# Altium footprint library ubloxLib.PcbLib: 65 footprints (part 2 of 5)
Each footprint in its own frame and in the unit in brackets; x right, y up, seen from the top. Pads: shape width x height; smd on the part's side, far side on the other; paste and mask are expansions set on the pad; w line width, h text height; cw(c..) or ccw(c..) is an arc to the next point about the centre after c.
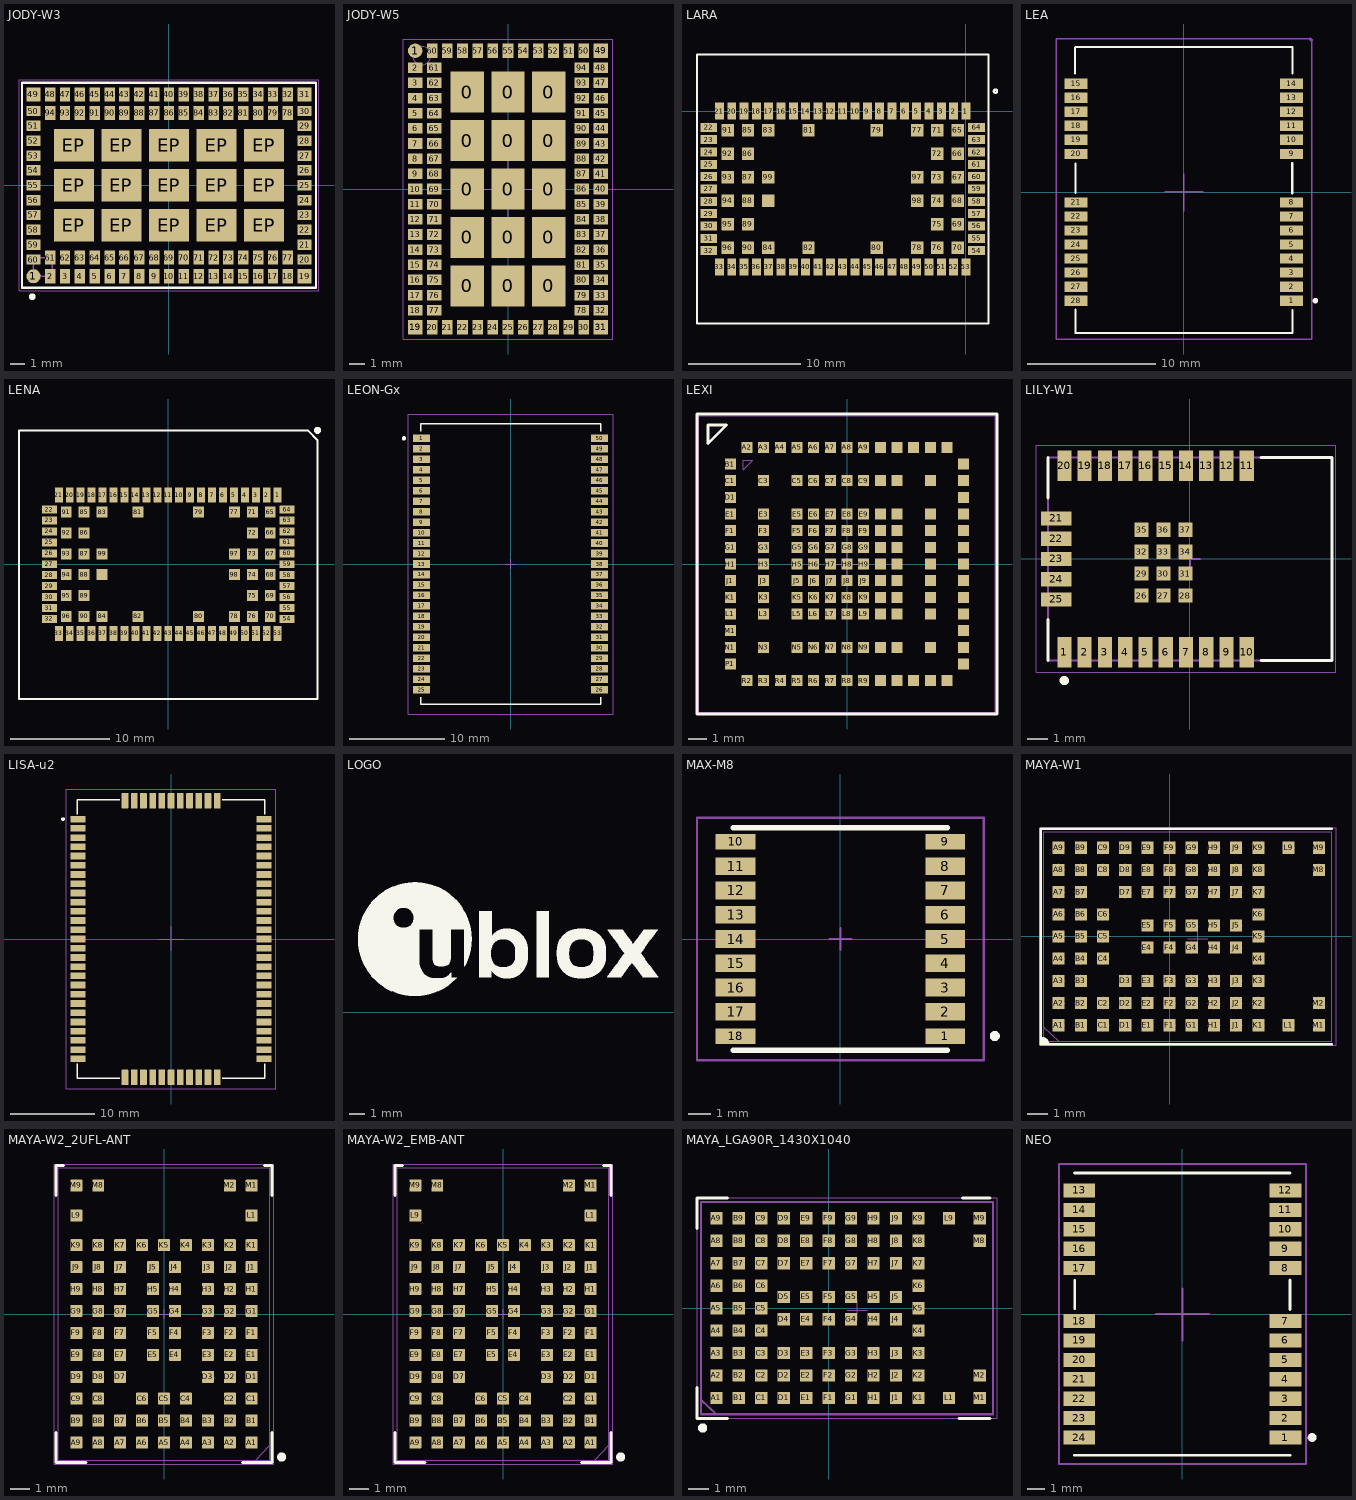
[diagram p1: the footprints below, top view; thin cyan lines are the x and y axes]

## JODY-W3 [mm] "Host-based modules with Wi-Fi and dual-mode Bluetooth"
height 2.5
pads (109):
  round 0.95 smd mask+0.05: 1(-9.125,-6.125)
  rect 0.7x0.95 smd mask+0.05: 2(-8,-6.125) 3(-7,-6.125) 4(-6,-6.125) 5(-5,-6.125) 6(-4,-6.125) 7(-3,-6.125) 8(-2,-6.125) 9(-1,-6.125) 10(0,-6.125) 12(2,-6.125) 13(3,-6.125) 14(4,-6.125) 15(5,-6.125) 17(7,-6.125) 18(8,-6.125) 32(8,6.125) 33(7,6.125) 34(6,6.125) 35(5,6.125) 36(4,6.125) 37(3,6.125) 38(2,6.125) 39(1,6.125) 40(0,6.125) 41(-1,6.125) 42(-2,6.125) 43(-3,6.125) 44(-4,6.125) 45(-5,6.125) 46(-6,6.125) 47(-7,6.125) 48(-8,6.125) 61(-8,-4.875) 62(-7,-4.875) 63(-6,-4.875) 64(-5,-4.875) 65(-4,-4.875) 66(-3,-4.875) 67(-2,-4.875) 68(-1,-4.875) 69(0,-4.875) 70(1,-4.875) 71(2,-4.875) 72(3,-4.875) 73(4,-4.875) 74(5,-4.875) 75(6,-4.875) 76(7,-4.875) 77(8,-4.875) 78(8,4.875) 79(7,4.875) 80(6,4.875) 81(5,4.875) 82(4,4.875) 83(3,4.875) 84(2,4.875) 85(1,4.875) 86(0,4.875) 87(-1,4.875) 88(-2,4.875) 89(-3,4.875) 90(-4,4.875) 91(-5,4.875) 92(-6,4.875) 93(-7,4.875) 94(-8,4.875)
  rect 0.7x0.95 smd paste+0 mask+0.05: 11(1,-6.125) 16(6,-6.125)
  rect 0.95x0.95 smd mask+0.05: 19(9.125,-6.125) 31(9.125,6.125) 49(-9.125,6.125)
  rect 0.95x0.7 smd mask+0.05: 20(9.125,-5) 21(9.125,-4) 22(9.125,-3) 23(9.125,-2) 24(9.125,-1) 25(9.125,0) 26(9.125,1) 27(9.125,2) 28(9.125,3) 29(9.125,4) 30(9.125,5) 50(-9.125,5) 51(-9.125,4) 52(-9.125,3) 53(-9.125,2) 54(-9.125,1) 55(-9.125,0) 56(-9.125,-1) 57(-9.125,-2) 58(-9.125,-3) 59(-9.125,-4) 60(-9.125,-5)
  rect 2.7x2.2 smd paste-10 mask+0.05: EP(-6.4,-2.7) EP(-6.4,0) EP(-6.4,2.7) EP(-3.2,-2.7) EP(-3.2,2.7) EP(-3.2,0) EP(0,-2.7) EP(0,0) EP(0,2.7) EP(3.2,-2.7) EP(3.2,0) EP(3.2,2.7) EP(6.4,2.7) EP(6.4,-2.7) EP(6.4,0)
Top Overlay:
  circle w0.254: c-9.2,-7.5 r0.1
  lines w0.15: -9.9,-6.9 -9.9,6.9 9.9,6.9 9.9,-6.9 -9.9,-6.9
Top Paste:
  rectangle: -7.525,-2.575 -6.525,-1.775
  rectangle: -6.275,-2.575 -5.275,-1.775
  rectangle: -7.525,-3.625 -6.525,-2.825
  rectangle: -6.275,-3.625 -5.275,-2.825
  rectangle: -7.525,0.125 -6.525,0.925
  rectangle: -6.275,0.125 -5.275,0.925
  rectangle: -7.525,-0.925 -6.525,-0.125
  rectangle: -6.275,-0.925 -5.275,-0.125
  rectangle: -4.325,-2.575 -3.325,-1.775
  rectangle: -3.075,-2.575 -2.075,-1.775
  rectangle: -4.325,-3.625 -3.325,-2.825
  rectangle: -3.075,-3.625 -2.075,-2.825
  rectangle: -4.325,0.125 -3.325,0.925
  rectangle: -3.075,0.125 -2.075,0.925
  rectangle: -4.325,-0.925 -3.325,-0.125
  rectangle: -3.075,-0.925 -2.075,-0.125
  rectangle: -1.125,-2.575 -0.125,-1.775
  rectangle: 0.125,-2.575 1.125,-1.775
  rectangle: -1.125,-3.625 -0.125,-2.825
  rectangle: 0.125,-3.625 1.125,-2.825
  rectangle: -1.125,0.125 -0.125,0.925
  rectangle: 0.125,0.125 1.125,0.925
  rectangle: -1.125,-0.925 -0.125,-0.125
  rectangle: 0.125,-0.925 1.125,-0.125
  rectangle: 2.075,0.125 3.075,0.925
  rectangle: 3.325,0.125 4.325,0.925
  rectangle: 2.075,-0.925 3.075,-0.125
  rectangle: 3.325,-0.925 4.325,-0.125
  rectangle: 2.075,-2.575 3.075,-1.775
  rectangle: 3.325,-2.575 4.325,-1.775
  rectangle: 2.075,-3.625 3.075,-2.825
  rectangle: 3.325,-3.625 4.325,-2.825
  rectangle: 5.275,-2.575 6.275,-1.775
  rectangle: 6.525,-2.575 7.525,-1.775
  rectangle: 5.275,-3.625 6.275,-2.825
  rectangle: 6.525,-3.625 7.525,-2.825
  rectangle: 5.275,0.125 6.275,0.925
  rectangle: 6.525,0.125 7.525,0.925
  rectangle: 5.275,-0.925 6.275,-0.125
  rectangle: 6.525,-0.925 7.525,-0.125
  rectangle: 5.275,2.825 6.275,3.625
  rectangle: 6.525,2.825 7.525,3.625
  rectangle: 5.275,1.775 6.275,2.575
  rectangle: 6.525,1.775 7.525,2.575
  rectangle: 2.075,2.825 3.075,3.625
  rectangle: 3.325,2.825 4.325,3.625
  rectangle: 2.075,1.775 3.075,2.575
  rectangle: 3.325,1.775 4.325,2.575
  rectangle: -1.125,2.825 -0.125,3.625
  rectangle: 0.125,2.825 1.125,3.625
  rectangle: -1.125,1.775 -0.125,2.575
  rectangle: 0.125,1.775 1.125,2.575
  rectangle: -4.325,2.825 -3.325,3.625
  rectangle: -3.075,2.825 -2.075,3.625
  rectangle: -4.325,1.775 -3.325,2.575
  rectangle: -3.075,1.775 -2.075,2.575
  rectangle: -7.525,2.825 -6.525,3.625
  rectangle: -6.275,2.825 -5.275,3.625
  rectangle: -7.525,1.775 -6.525,2.575
  rectangle: -6.275,1.775 -5.275,2.575
Mechanical 13:
  circle w0.1: c-8.5,-5.5 r0.632
  lines w0.1: -9.9,-6.9 -9.9,6.9 9.9,6.9 9.9,-6.9 -9.9,-6.9
Mechanical 15:
  lines w0.05: -10.1,-7.1 -10.1,7.1 10.1,7.1 10.1,-7.1 -10.1,-7.1
  lines w0.1: -1,0 1,0 ; 0,-1 0,1
  text ".Designator" at 0.1,0.433 h1
3D body "JODY_W3_3D.STEP": height 2.43, standoff 0.01, extent -9.9,-6.9 9.9,6.9

## JODY-W5 [mm] "Module footprint for EVB (include Paste Mask)"
pads (109):
  rect 2.2x2.7 smd mask+0.05: 0(-2.7,-6.4) 0(-2.7,-3.2) 0(-2.7,0) 0(-2.7,3.2) 0(-2.7,6.4) 0(0,-6.4) 0(0,-3.2) 0(0,0) 0(0,3.2) 0(0,6.4) 0(2.7,-6.4) 0(2.7,-3.2) 0(2.7,0) 0(2.7,3.2) 0(2.7,6.4)
  round 0.95 smd mask+0.05: 1(-6.125,9.125)
  rect 0.95x0.7 smd mask+0.05: 2(-6.125,8) 3(-6.125,7) 4(-6.125,6) 5(-6.125,5) 6(-6.125,4) 7(-6.125,3) 8(-6.125,2) 9(-6.125,1) 10(-6.125,0) 11(-6.125,-1) 12(-6.125,-2) 13(-6.125,-3) 14(-6.125,-4) 15(-6.125,-5) 16(-6.125,-6) 17(-6.125,-7) 18(-6.125,-8) 32(6.125,-8) 33(6.125,-7) 34(6.125,-6) 35(6.125,-5) 36(6.125,-4) 37(6.125,-3) 38(6.125,-2) 39(6.125,-1) 40(6.125,0) 41(6.125,1) 42(6.125,2) 43(6.125,3) 44(6.125,4) 45(6.125,5) 46(6.125,6) 47(6.125,7) 48(6.125,8) 61(-4.875,8) 62(-4.875,7) 63(-4.875,6) 64(-4.875,5) 65(-4.875,4) 66(-4.875,3) 67(-4.875,2) 68(-4.875,1) 69(-4.875,0) 70(-4.875,-1) 71(-4.875,-2) 72(-4.875,-3) 73(-4.875,-4) 74(-4.875,-5) 75(-4.875,-6) 76(-4.875,-7) 77(-4.875,-8) 78(4.875,-8) 79(4.875,-7) 80(4.875,-6) 81(4.875,-5) 82(4.875,-4) 83(4.875,-3) 84(4.875,-2) 85(4.875,-1) 86(4.875,0) 87(4.875,1) 88(4.875,2) 89(4.875,3) 90(4.875,4) 91(4.875,5) 92(4.875,6) 93(4.875,7) 94(4.875,8)
  rect 0.95x0.95 smd mask+0.05: 19(-6.125,-9.125) 31(6.125,-9.125) 49(6.125,9.125)
  rect 0.7x0.95 smd mask+0.05: 20(-5,-9.125) 21(-4,-9.125) 22(-3,-9.125) 23(-2,-9.125) 24(-1,-9.125) 25(0,-9.125) 26(1,-9.125) 27(2,-9.125) 28(3,-9.125) 29(4,-9.125) 30(5,-9.125) 50(5,9.125) 51(4,9.125) 52(3,9.125) 53(2,9.125) 54(1,9.125) 55(0,9.125) 56(-1,9.125) 57(-2,9.125) 58(-3,9.125) 59(-4,9.125) 60(-5,9.125)
Mechanical 11:
  text ".Designator" at 0,0 h0.5
Mechanical 13:
  circle w0.05: c-5.7,8.8 r0.6
  lines w0.05: -6.9,-9.9 6.9,-9.9 6.9,9.9 -6.9,9.9 -6.9,-9.9
  text ".Designator" at 0,0 h0.5
Mechanical 15:
  lines w0.05: -2,0 2,0 ; 0,-2 0,2
3D body: height 2.51, standoff 2.5, extent -6.2,8.3 -5.2,9.3
3D body: height 2.5, standoff 0.75, extent -6.5,-9.5 6.5,9.5
3D body: height 0.75, standoff 0, extent -6.9,-9.9 6.9,9.9

## LARA [mm] "Footprint for LARA modules"
pads (100):
  rect 0.8x1.5 smd paste-2539.97: 1(0,0) 2(-1.1,0) 3(-2.2,0) 4(-3.3,0) 5(-4.4,0) 6(-5.5,0) 7(-6.6,0) 8(-7.7,0) 9(-8.8,0) 10(-9.9,0) 11(-11,0) 12(-12.1,0) 13(-13.2,0) 14(-14.3,0) 15(-15.4,0) 16(-16.5,0) 17(-17.6,0) 18(-18.7,0) 19(-19.8,0) 20(-20.9,0) 21(-22,0) 33(-22,-13.9) 34(-20.9,-13.9) 35(-19.8,-13.9) 36(-18.7,-13.9) 37(-17.6,-13.9) 38(-16.5,-13.9) 39(-15.4,-13.9) 40(-14.3,-13.9) 41(-13.2,-13.9) 42(-12.1,-13.9) 43(-11,-13.9) 44(-9.9,-13.9) 45(-8.8,-13.9) 46(-7.7,-13.9) 47(-6.6,-13.9) 48(-5.5,-13.9) 49(-4.4,-13.9) 50(-3.3,-13.9) 51(-2.2,-13.9) 52(-1.1,-13.9) 53(0,-13.9)
  rect 1.5x0.8 smd paste-2539.97: 22(-22.95,-1.45) 23(-22.95,-2.55) 24(-22.95,-3.65) 25(-22.95,-4.75) 26(-22.95,-5.85) 27(-22.95,-6.95) 28(-22.95,-8.05) 29(-22.95,-9.15) 30(-22.95,-10.25) 31(-22.95,-11.35) 32(-22.95,-12.45) 54(0.95,-12.45) 55(0.95,-11.35) 56(0.95,-10.25) 57(0.95,-9.15) 58(0.95,-8.05) 59(0.95,-6.95) 60(0.95,-5.85) 61(0.95,-4.75) 62(0.95,-3.65) 63(0.95,-2.55) 64(0.95,-1.45)
  rect 1.1x1.1 smd paste-0.025: 65(-0.75,-1.7) 66(-0.75,-3.8) 67(-0.75,-5.9) 68(-0.75,-8) 69(-0.75,-10.1) 70(-0.75,-12.2) 71(-2.55,-1.7) 72(-2.55,-3.8) 73(-2.55,-5.9) 74(-2.55,-8) 75(-2.55,-10.1) 76(-2.55,-12.2) 77(-4.35,-1.7) 78(-4.35,-12.2) 79(-7.95,-1.7) 80(-7.95,-12.2) 81(-14.05,-1.7) 82(-14.05,-12.2) 83(-17.65,-1.7) 84(-17.65,-12.2) 85(-19.45,-1.7) 86(-19.45,-3.8) 87(-19.45,-5.9) 88(-19.45,-8) 89(-19.45,-10.1) 90(-19.45,-12.2) 91(-21.25,-1.7) 92(-21.25,-3.8) 93(-21.25,-5.9) 94(-21.25,-8) 95(-21.25,-10.1) 96(-21.25,-12.2) 97(-4.35,-5.9) 98(-4.35,-8) 99(-17.65,-5.9) 100(-17.65,-8)
Top Overlay:
  circle w0.2: c2.625,1.775 r0.141
  lines w0.2: -24,-18.95 2,-18.95 2,5.05 -24,5.05 -24,-18.95
Top Paste:
  drawing of 64 lines, arcs and shapes, not listed
3D body "Lara.STEP": height 2.63, standoff 0.03, extent -24.029,-18.948 1.971,5.052

## LEA [mm] "u-blox LEA GNSS module"
pads (28):
  rect 1.8x0.8 smd paste-4: 1(8.445,-8.5)
  rect 1.8x0.8 smd paste-0.4 mask+0.102: 2(8.445,-7.4) 3(8.445,-6.3) 4(8.445,-5.2) 5(8.445,-4.1) 6(8.445,-3) 7(8.445,-1.9) 8(8.445,-0.8) 9(8.445,3) 10(8.445,4.1) 11(8.445,5.2) 12(8.445,6.3) 13(8.445,7.4) 14(8.445,8.5) 16(-8.445,7.4) 17(-8.445,6.3) 18(-8.445,5.2) 19(-8.445,4.1) 20(-8.445,3) 21(-8.445,-0.8) 22(-8.445,-1.9) 23(-8.445,-3) 24(-8.445,-4.1) 25(-8.445,-5.2) 26(-8.445,-6.3) 27(-8.445,-7.4) 28(-8.445,-8.5)
  rect 1.8x0.8 smd paste-0.4: 15(-8.445,8.5)
Top Overlay:
  circle w0.38: c10.3,-8.5 r0.026
  lines w0.16: -8.514,9.28 -8.514,11.344 -8.495,11.363 8.497,11.363 8.497,9.28 ; -8.508,-0.08 -8.508,2.238 ; -8.501,-9.198 -8.501,-11.027 -8.489,-11.04 8.485,-11.04 8.497,-11.027 8.497,-9.237 ; 8.485,-0.093 8.485,2.276
Top Paste:
  rectangle: -8.505,-8.8 -7.855,-8.2
  rectangle: -8.505,-6.6 -7.855,-6
  rectangle: -8.505,-5.5 -7.855,-4.9
  rectangle: -8.505,-4.4 -7.855,-3.8
  rectangle: -8.505,-3.3 -7.855,-2.7
  rectangle: -8.505,-2.2 -7.855,-1.6
  rectangle: -8.505,-1.1 -7.855,-0.5
  rectangle: -8.505,-7.7 -7.855,-7.1
  rectangle: -9.604,-8.9 -8.504,-8.1
  rectangle: -9.604,-7.8 -8.504,-7
  rectangle: -9.604,-6.7 -8.504,-5.9
  rectangle: -9.604,-5.6 -8.504,-4.8
  rectangle: -9.604,-4.5 -8.504,-3.7
  rectangle: -9.604,-3.4 -8.504,-2.6
  rectangle: -9.604,-2.3 -8.504,-1.5
  rectangle: -9.604,-1.2 -8.504,-0.4
  rectangle: -8.504,2.7 -7.854,3.3
  rectangle: -8.504,3.8 -7.854,4.4
  rectangle: -8.504,4.9 -7.854,5.5
  rectangle: -8.504,6 -7.854,6.6
  rectangle: -8.504,8.2 -7.854,8.8
  rectangle: -8.504,7.1 -7.854,7.7
  rectangle: -9.604,2.6 -8.504,3.4
  rectangle: -9.604,3.7 -8.504,4.5
  rectangle: -9.604,5.9 -8.504,6.7
  rectangle: -9.604,7 -8.504,7.8
  rectangle: -9.604,8.1 -8.504,8.9
  rectangle: -9.604,4.8 -8.504,5.6
  rectangle: 7.845,-7.7 8.495,-7.1
  rectangle: 7.845,7.1 8.495,7.7
  rectangle: 7.845,8.2 8.495,8.8
  rectangle: 7.845,6 8.495,6.6
  rectangle: 7.845,4.9 8.495,5.5
  rectangle: 7.845,3.8 8.495,4.4
  rectangle: 7.845,2.7 8.495,3.3
  rectangle: 7.845,-1.1 8.495,-0.5
  rectangle: 7.845,-2.2 8.495,-1.6
  rectangle: 7.845,-3.3 8.495,-2.7
  rectangle: 7.845,-4.4 8.495,-3.8
  rectangle: 7.845,-5.5 8.495,-4.9
  rectangle: 7.845,-6.6 8.495,-6
  rectangle: 7.845,-8.8 8.495,-8.2
  rectangle: 8.495,4.8 9.596,5.6
  rectangle: 8.495,8.1 9.596,8.9
  rectangle: 8.495,7 9.596,7.8
  rectangle: 8.495,5.9 9.596,6.7
  rectangle: 8.495,3.7 9.596,4.5
  rectangle: 8.495,2.6 9.596,3.4
  rectangle: 8.496,-1.2 9.596,-0.4
  rectangle: 8.496,-2.3 9.596,-1.5
  rectangle: 8.496,-3.4 9.596,-2.6
  rectangle: 8.496,-4.5 9.596,-3.7
  rectangle: 8.496,-5.6 9.596,-4.8
  rectangle: 8.496,-6.7 9.596,-5.9
  rectangle: 8.496,-7.8 9.596,-7
  rectangle: 8.496,-8.9 9.596,-8.1
Mechanical 15:
  lines w0.1: -1.5,0.019 -0.001,0.019 ; -0.001,-1.5 -0.001,0.019 ; -0.001,1.464 -0.001,0.019 ; 1.5,0.019 -0.001,0.019 ; 9.9,12 -10,12 -10,-11.5 10,-11.5 10,11.9
  lines w0.254: 9.9,12 10,11.9
  text ".Designator" at 0.099,0.452 h1
3D body "LEA ( STEP-AP214).STEP": height 2.35, standoff -0.05, extent -8.502,-11.015 8.498,11.385

## LENA [mm] "Footprint for LENA modules"
pads (100):
  rect 0.8x1.5 smd paste-2539.97: 1(11,6.95) 2(9.9,6.95) 3(8.8,6.95) 4(7.7,6.95) 5(6.6,6.95) 6(5.5,6.95) 7(4.4,6.95) 8(3.3,6.95) 9(2.2,6.95) 10(1.1,6.95) 11(0,6.95) 12(-1.1,6.95) 13(-2.2,6.95) 14(-3.3,6.95) 15(-4.4,6.95) 16(-5.5,6.95) 17(-6.6,6.95) 18(-7.7,6.95) 19(-8.8,6.95) 20(-9.9,6.95) 21(-11,6.95) 33(-11,-6.95) 34(-9.9,-6.95) 35(-8.8,-6.95) 36(-7.7,-6.95) 37(-6.6,-6.95) 38(-5.5,-6.95) 39(-4.4,-6.95) 40(-3.3,-6.95) 41(-2.2,-6.95) 42(-1.1,-6.95) 43(0,-6.95) 44(1.1,-6.95) 45(2.2,-6.95) 46(3.3,-6.95) 47(4.4,-6.95) 48(5.5,-6.95) 49(6.6,-6.95) 50(7.7,-6.95) 51(8.8,-6.95) 52(9.9,-6.95) 53(11,-6.95)
  rect 1.5x0.8 smd paste-2539.97: 22(-11.95,5.5) 23(-11.95,4.4) 24(-11.95,3.3) 25(-11.95,2.2) 26(-11.95,1.1) 27(-11.95,0) 28(-11.95,-1.1) 29(-11.95,-2.2) 30(-11.95,-3.3) 31(-11.95,-4.4) 32(-11.95,-5.5) 54(11.95,-5.5) 55(11.95,-4.4) 56(11.95,-3.3) 57(11.95,-2.2) 58(11.95,-1.1) 59(11.95,0) 60(11.95,1.1) 61(11.95,2.2) 62(11.95,3.3) 63(11.95,4.4) 64(11.95,5.5)
  rect 1.1x1.1 smd paste-0.025: 65(10.25,5.25) 66(10.25,3.15) 67(10.25,1.05) 68(10.25,-1.05) 69(10.25,-3.15) 70(10.25,-5.25) 71(8.45,5.25) 72(8.45,3.15) 73(8.45,1.05) 74(8.45,-1.05) 75(8.45,-3.15) 76(8.45,-5.25) 77(6.65,5.25) 78(6.65,-5.25) 79(3.05,5.25) 80(3.05,-5.25) 81(-3.05,5.25) 82(-3.05,-5.25) 83(-6.65,5.25) 84(-6.65,-5.25) 85(-8.45,5.25) 86(-8.45,3.15) 87(-8.45,1.05) 88(-8.45,-1.05) 89(-8.45,-3.15) 90(-8.45,-5.25) 91(-10.25,5.25) 92(-10.25,3.15) 93(-10.25,1.05) 94(-10.25,-1.05) 95(-10.25,-3.15) 96(-10.25,-5.25) 97(6.65,1.05) 98(6.65,-1.05) 99(-6.65,1.05) 100(-6.65,-1.05)
Top Overlay:
  circle w0.4: c15,13.45 r0.15
  lines w0.2: -15,-13.55 -15,13.45 14,13.45 15,12.45 15,-13.55 -15,-13.55
Top Paste:
  drawing of 64 lines, arcs and shapes, not listed
3D body "LENA-R8.stp": height 2.7, standoff 0, extent -15,-13.55 15,13.45

## LEON-Gx [mm] "quad-band GSM/GPRS data & voice module"
height 3.3
pads (50):
  rrect5% 1.8x0.8 smd paste-1: 1(-9.35,13.2) 2(-9.35,12.1) 3(-9.35,11) 4(-9.35,9.9) 5(-9.35,8.8) 6(-9.35,7.7) 7(-9.35,6.6) 8(-9.35,5.5) 9(-9.35,4.4) 10(-9.35,3.3) 11(-9.35,2.2) 12(-9.35,1.1) 13(-9.35,0) 14(-9.35,-1.1) 15(-9.35,-2.2) 16(-9.35,-3.3) 17(-9.35,-4.4) 18(-9.35,-5.5) 19(-9.35,-6.6) 20(-9.35,-7.7) 21(-9.35,-8.8) 22(-9.35,-9.9) 23(-9.35,-11) 24(-9.35,-12.1) 25(-9.35,-13.2) 26(9.35,-13.2) 27(9.35,-12.1) 28(9.35,-11) 29(9.35,-9.9) 30(9.35,-8.8) 31(9.35,-7.7) 32(9.35,-6.6) 33(9.35,-5.5) 34(9.35,-4.4) 35(9.35,-3.3) 36(9.35,-2.2) 37(9.35,-1.1) 38(9.35,0) 39(9.35,1.1) 40(9.35,2.2) 41(9.35,3.3) 42(9.35,4.4) 43(9.35,5.5) 44(9.35,6.6) 45(9.35,7.7) 46(9.35,8.8) 47(9.35,9.9) 48(9.35,11) 49(9.35,12.1) 50(9.35,13.2)
Top Overlay:
  circle w0.254: c-11.2,13.2 r0.1
  lines w0.15: -9.45,-14 -9.45,-14.75 9.45,-14.75 9.45,-14 ; -9.45,13.95 -9.45,14.75 9.45,14.75 9.45,13.95
Top Paste:
  rectangle: 8.55,12.9 9.45,13.5
  rectangle: 8.55,11.8 9.45,12.4
  rectangle: 8.55,9.6 9.45,10.2
  rectangle: 8.55,10.7 9.45,11.3
  rectangle: 8.55,8.5 9.45,9.1
  rectangle: 8.55,7.4 9.45,8
  rectangle: 8.55,5.2 9.45,5.8
  rectangle: 8.55,6.3 9.45,6.9
  rectangle: 8.55,4.1 9.45,4.7
  rectangle: 8.55,3 9.45,3.6
  rectangle: 8.55,0.8 9.45,1.4
  rectangle: 8.55,1.9 9.45,2.5
  rectangle: 8.55,-0.3 9.45,0.3
  rectangle: 8.55,-1.4 9.45,-0.8
  rectangle: 8.55,-3.6 9.45,-3
  rectangle: 8.55,-2.5 9.45,-1.9
  rectangle: 8.55,-4.7 9.45,-4.1
  rectangle: 8.55,-5.8 9.45,-5.2
  rectangle: 8.55,-8 9.45,-7.4
  rectangle: 8.55,-6.9 9.45,-6.3
  rectangle: 8.55,-9.1 9.45,-8.5
  rectangle: 8.55,-10.2 9.45,-9.6
  rectangle: 8.55,-12.4 9.45,-11.8
  rectangle: 8.55,-11.3 9.45,-10.7
  rectangle: 8.55,-13.5 9.45,-12.9
  rectangle: -9.45,-13.5 -8.55,-12.9
  rectangle: -9.45,-9.1 -8.55,-8.5
  rectangle: -9.45,-11.3 -8.55,-10.7
  rectangle: -9.45,-10.2 -8.55,-9.6
  rectangle: -9.45,-12.4 -8.55,-11.8
  rectangle: -9.45,-4.7 -8.55,-4.1
  rectangle: -9.45,-6.9 -8.55,-6.3
  rectangle: -9.45,-5.8 -8.55,-5.2
  rectangle: -9.45,-8 -8.55,-7.4
  rectangle: -9.45,-0.3 -8.55,0.3
  rectangle: -9.45,-2.5 -8.55,-1.9
  rectangle: -9.45,-1.4 -8.55,-0.8
  rectangle: -9.45,-3.6 -8.55,-3
  rectangle: -9.45,4.1 -8.55,4.7
  rectangle: -9.45,1.9 -8.55,2.5
  rectangle: -9.45,3 -8.55,3.6
  rectangle: -9.45,0.8 -8.55,1.4
  rectangle: -9.45,8.5 -8.55,9.1
  rectangle: -9.45,6.3 -8.55,6.9
  rectangle: -9.45,7.4 -8.55,8
  rectangle: -9.45,5.2 -8.55,5.8
  rectangle: -9.45,9.6 -8.55,10.2
  rectangle: -9.45,11.8 -8.55,12.4
  rectangle: -9.45,10.7 -8.55,11.3
  rectangle: -9.45,12.9 -8.55,13.5
  rectangle: 9.45,11.7 10.65,12.5
  rectangle: 9.45,10.6 10.65,11.4
  rectangle: 9.45,9.5 10.65,10.3
  rectangle: 9.45,8.4 10.65,9.2
  rectangle: 9.45,7.3 10.65,8.1
  rectangle: 9.45,6.2 10.65,7
  rectangle: 9.45,5.1 10.65,5.9
  rectangle: 9.45,4 10.65,4.8
  rectangle: 9.45,2.9 10.65,3.7
  rectangle: 9.45,1.8 10.65,2.6
  rectangle: 9.45,0.7 10.65,1.5
  rectangle: 9.45,-0.4 10.65,0.4
  rectangle: 9.45,-1.5 10.65,-0.7
  rectangle: 9.45,-2.6 10.65,-1.8
  rectangle: 9.45,-3.7 10.65,-2.9
  rectangle: 9.45,-4.8 10.65,-4
  rectangle: 9.45,-5.9 10.65,-5.1
  rectangle: 9.45,-7 10.65,-6.2
  rectangle: 9.45,-8.1 10.65,-7.3
  rectangle: 9.45,-9.2 10.65,-8.4
  rectangle: 9.45,-10.3 10.65,-9.5
  rectangle: 9.45,-11.4 10.65,-10.6
  rectangle: 9.45,-12.5 10.65,-11.7
  rectangle: 9.45,-13.6 10.65,-12.8
  rectangle: -10.65,-8.1 -9.45,-7.3
  rectangle: -10.65,-9.2 -9.45,-8.4
  rectangle: -10.65,-10.3 -9.45,-9.5
  rectangle: -10.65,-11.4 -9.45,-10.6
  rectangle: -10.65,-12.5 -9.45,-11.7
  rectangle: -10.65,-13.6 -9.45,-12.8
  rectangle: -10.65,-7 -9.45,-6.2
  rectangle: -10.65,-5.9 -9.45,-5.1
  rectangle: -10.65,-4.8 -9.45,-4
  rectangle: -10.65,-3.7 -9.45,-2.9
  rectangle: -10.65,-2.6 -9.45,-1.8
  rectangle: -10.65,-1.5 -9.45,-0.7
  rectangle: -10.65,-0.4 -9.45,0.4
  rectangle: -10.65,0.7 -9.45,1.5
  rectangle: -10.65,1.8 -9.45,2.6
  rectangle: -10.65,2.9 -9.45,3.7
  rectangle: -10.65,4 -9.45,4.8
  rectangle: -10.65,5.1 -9.45,5.9
  rectangle: -10.65,6.2 -9.45,7
  rectangle: -10.65,7.3 -9.45,8.1
  rectangle: -10.65,8.4 -9.45,9.2
  rectangle: -10.65,9.5 -9.45,10.3
  rectangle: -10.65,10.6 -9.45,11.4
  rectangle: -10.65,11.7 -9.45,12.5
  rectangle: 9.45,12.8 10.65,13.6
  rectangle: -10.65,12.8 -9.45,13.6
Mechanical 15:
  lines w0.05: -0.5,0 0.5,0 ; 0,-0.5 0,0.5 ; -10.75,-15.75 -10.75,15.75 10.75,15.75 10.75,-15.75 -10.75,-15.75
  text ".Designator" at 0.1,0.433 h1
3D body: height 3.2, standoff 0.9, extent -8.95,-14.2 8.95,14.25
3D body: height 0.9, standoff 0, extent -9.45,-14.75 9.45,14.75
3D body: height 3.3, standoff 3.2, extent -8.575,-13.825 8.575,13.875

## LEXI [mm]
pads (133):
  rect 0.6x0.6 smd mask+0: A2(-5.4,6.3) A3(-4.5,6.3) A4(-3.6,6.3) A5(-2.7,6.3) A6(-1.8,6.3) A7(-0.9,6.3) A8(0,6.3) A9(0.9,6.3) A10(1.8,6.3) A11(2.7,6.3) A12(3.6,6.3) A13(4.5,6.3) A14(5.4,6.3) B1(-6.3,5.4) B15(6.3,5.4) C1(-6.3,4.5) C3(-4.5,4.5) C5(-2.7,4.5) C6(-1.8,4.5) C7(-0.9,4.5) C8(0,4.5) C9(0.9,4.5) C10(1.8,4.5) C11(2.7,4.5) C13(4.5,4.5) C15(6.3,4.5) D1(-6.3,3.6) D15(6.3,3.6) E1(-6.3,2.7) E3(-4.5,2.7) E5(-2.7,2.7) E6(-1.8,2.7) E7(-0.9,2.7) E8(0,2.7) E9(0.9,2.7) E10(1.8,2.7) E11(2.7,2.7) E13(4.5,2.7) E15(6.3,2.7) F1(-6.3,1.8) F3(-4.5,1.8) F5(-2.7,1.8) F6(-1.8,1.8) F7(-0.9,1.8) F8(0,1.8) F9(0.9,1.8) F10(1.8,1.8) F11(2.7,1.8) F13(4.5,1.8) F15(6.3,1.8) G1(-6.3,0.9) G3(-4.5,0.9) G5(-2.7,0.9) G6(-1.8,0.9) G7(-0.9,0.9) G8(0,0.9) G9(0.9,0.9) G10(1.8,0.9) G11(2.7,0.9) G13(4.5,0.9) G15(6.3,0.9) H1(-6.3,0) H3(-4.5,0) H5(-2.7,0) H6(-1.8,0) H7(-0.9,0) H8(0,0) H9(0.9,0) H10(1.8,0) H11(2.7,0) H13(4.5,0) H15(6.3,0) J1(-6.3,-0.9) J3(-4.5,-0.9) J5(-2.7,-0.9) J6(-1.8,-0.9) J7(-0.9,-0.9) J8(0,-0.9) J9(0.9,-0.9) J10(1.8,-0.9) J11(2.7,-0.9) J13(4.5,-0.9) J15(6.3,-0.9) K1(-6.3,-1.8) K3(-4.5,-1.8) K5(-2.7,-1.8) K6(-1.8,-1.8) K7(-0.9,-1.8) K8(0,-1.8) K9(0.9,-1.8) K10(1.8,-1.8) K11(2.7,-1.8) K13(4.5,-1.8) K15(6.3,-1.8) L1(-6.3,-2.7) L3(-4.5,-2.7) L5(-2.7,-2.7) L6(-1.8,-2.7) L7(-0.9,-2.7) L8(0,-2.7) L9(0.9,-2.7) L10(1.8,-2.7) L11(2.7,-2.7) L13(4.5,-2.7) L15(6.3,-2.7) M1(-6.3,-3.6) M15(6.3,-3.6) N1(-6.3,-4.5) N3(-4.5,-4.5) N5(-2.7,-4.5) N6(-1.8,-4.5) N7(-0.9,-4.5) N8(0,-4.5) N9(0.9,-4.5) N10(1.8,-4.5) N11(2.7,-4.5) N13(4.5,-4.5) N15(6.3,-4.5) P1(-6.3,-5.4) P15(6.3,-5.4) R2(-5.4,-6.3) R3(-4.5,-6.3) R4(-3.6,-6.3) R5(-2.7,-6.3) R6(-1.8,-6.3) R7(-0.9,-6.3) R8(0,-6.3) R9(0.9,-6.3) R10(1.8,-6.3) R11(2.7,-6.3) R12(3.6,-6.3) R13(4.5,-6.3) R14(5.4,-6.3)
Top Overlay:
  lines w0.15: -8.1,-8.1 8.1,-8.1 8.1,8.1 -8.1,8.1 -8.1,-8.1 ; -7.5,6.5 -6.5,7.5 -7.5,7.5 -7.5,6.5
Mechanical 4:
  text "P15" at 6.14,-5.4 h0.13
  text "R13" at 4.34,-6.3 h0.13
  text "N3" at -4.606,-4.5 h0.13
  text "K9" at 0.794,-1.8 h0.13
  text "A14" at 5.24,6.3 h0.13
  text "H6" at -1.906,0 h0.13
  text "L9" at 0.794,-2.7 h0.13
  text "L10" at 1.64,-2.7 h0.13
  text "K6" at -1.906,-1.8 h0.13
  text "L3" at -4.606,-2.7 h0.13
  text "F1" at -6.406,1.8 h0.13
  text "K10" at 1.64,-1.8 h0.13
  text "R2" at -5.506,-6.3 h0.13
  text "F10" at 1.64,1.8 h0.13
  text "R6" at -1.906,-6.3 h0.13
  text "H7" at -1.006,0 h0.13
  text "J1" at -6.406,-0.9 h0.13
  text "N6" at -1.906,-4.5 h0.13
  text "K3" at -4.606,-1.8 h0.13
  text "R4" at -3.706,-6.3 h0.13
  text "J5" at -2.806,-0.9 h0.13
  text "N9" at 0.794,-4.5 h0.13
  text "J11" at 2.54,-0.9 h0.13
  text "F5" at -2.806,1.8 h0.13
  text "H11" at 2.54,0 h0.13
  text "N8" at -0.106,-4.5 h0.13
  text "F9" at 0.794,1.8 h0.13
  text "F15" at 6.14,1.8 h0.13
  text "C8" at -0.106,4.5 h0.13
  text "C11" at 2.54,4.5 h0.13
  text "R9" at 0.794,-6.3 h0.13
  text "G8" at -0.106,0.9 h0.13
  text "C13" at 4.34,4.5 h0.13
  text "G13" at 4.34,0.9 h0.13
  text "L6" at -1.906,-2.7 h0.13
  text "H3" at -4.606,0 h0.13
  text "M1" at -6.406,-3.6 h0.13
  text "K15" at 6.14,-1.8 h0.13
  text "A2" at -5.506,6.3 h0.13
  text "J13" at 4.34,-0.9 h0.13
  text "L8" at -0.106,-2.7 h0.13
  text "C7" at -1.006,4.5 h0.13
  text "E7" at -1.006,2.7 h0.13
  text "A6" at -1.906,6.3 h0.13
  text "L1" at -6.406,-2.7 h0.13
  text "F6" at -1.906,1.8 h0.13
  text "J6" at -1.906,-0.9 h0.13
  text "J15" at 6.14,-0.9 h0.13
  text "K13" at 4.34,-1.8 h0.13
  text "R14" at 5.24,-6.3 h0.13
  text "L11" at 2.54,-2.7 h0.13
  text "N15" at 6.14,-4.5 h0.13
  text "F3" at -4.606,1.8 h0.13
  text "E8" at -0.106,2.7 h0.13
  text "L7" at -1.006,-2.7 h0.13
  text "H15" at 6.14,0 h0.13
  text "H5" at -2.806,0 h0.13
  text "F7" at -1.006,1.8 h0.13
  text "C9" at 0.794,4.5 h0.13
  text "E3" at -4.606,2.7 h0.13
  text "A9" at 0.794,6.3 h0.13
  text "A12" at 3.44,6.3 h0.13
  text "K5" at -2.806,-1.8 h0.13
  text "E6" at -1.906,2.7 h0.13
  text "K8" at -0.106,-1.8 h0.13
  text "F11" at 2.54,1.8 h0.13
  text "E15" at 6.14,2.7 h0.13
  text "E10" at 1.64,2.7 h0.13
  text "N13" at 4.34,-4.5 h0.13
  text "E1" at -6.406,2.7 h0.13
  text "G15" at 6.14,0.9 h0.13
  text "C10" at 1.64,4.5 h0.13
  text "A10" at 1.64,6.3 h0.13
  text "F8" at -0.106,1.8 h0.13
  text "A3" at -4.606,6.3 h0.13
  text "E11" at 2.54,2.7 h0.13
  text "R3" at -4.606,-6.3 h0.13
  text "N11" at 2.54,-4.5 h0.13
  text "N10" at 1.64,-4.5 h0.13
  text "A11" at 2.54,6.3 h0.13
  text "G7" at -1.006,0.9 h0.13
  text "E5" at -2.806,2.7 h0.13
  text "G3" at -4.606,0.9 h0.13
  text "L15" at 6.14,-2.7 h0.13
  text "G5" at -2.806,0.9 h0.13
  text "P1" at -6.406,-5.4 h0.13
  text "K7" at -1.006,-1.8 h0.13
  text "C6" at -1.906,4.5 h0.13
  text "R5" at -2.806,-6.3 h0.13
  text "H8" at -0.106,0 h0.13
  text "L5" at -2.806,-2.7 h0.13
  text "H1" at -6.406,0 h0.13
  text "R11" at 2.54,-6.3 h0.13
  text "A4" at -3.706,6.3 h0.13
  text "C15" at 6.14,4.5 h0.13
  text "J9" at 0.794,-0.9 h0.13
  text "R8" at -0.106,-6.3 h0.13
  text "H9" at 0.794,0 h0.13
  text "R10" at 1.64,-6.3 h0.13
  text "R12" at 3.44,-6.3 h0.13
  text "E13" at 4.34,2.7 h0.13
  text "E9" at 0.794,2.7 h0.13
  text "H13" at 4.34,0 h0.13
  text "G9" at 0.794,0.9 h0.13
  text "A5" at -2.806,6.3 h0.13
  text "R7" at -1.006,-6.3 h0.13
  text "J7" at -1.006,-0.9 h0.13
  text "B1" at -6.406,5.4 h0.13
  text "B15" at 6.14,5.4 h0.13
  text "M15" at 6.14,-3.6 h0.13
  text "N7" at -1.006,-4.5 h0.13
  text "H10" at 1.64,0 h0.13
  text "L13" at 4.34,-2.7 h0.13
  text "K1" at -6.406,-1.8 h0.13
  text "A8" at -0.106,6.3 h0.13
  text "D1" at -6.406,3.6 h0.13
  text "J3" at -4.606,-0.9 h0.13
  text "G11" at 2.54,0.9 h0.13
  text "D15" at 6.14,3.6 h0.13
  text "K11" at 2.54,-1.8 h0.13
  text "G1" at -6.406,0.9 h0.13
  text "N1" at -6.406,-4.5 h0.13
  text "A13" at 4.34,6.3 h0.13
  text "G10" at 1.64,0.9 h0.13
  text "J10" at 1.64,-0.9 h0.13
  text "G6" at -1.906,0.9 h0.13
  text "A7" at -1.006,6.3 h0.13
  text "C3" at -4.606,4.5 h0.13
  text "C1" at -6.406,4.5 h0.13
  text "F13" at 4.34,1.8 h0.13
  text "J8" at -0.106,-0.9 h0.13
  text "N5" at -2.806,-4.5 h0.13
  text "C5" at -2.806,4.5 h0.13
Mechanical 11:
  text ".Designator" at -0.6,-0.2 h0.55
Mechanical 13:
  lines w0.05: -8,-8 -8,8 8,8 8,-8 -8,-8 ; -5.6,5.1 -5.6,5.6 -5.1,5.6 -5.6,5.1
Mechanical 15:
  lines w0.05: -0.635,0 0.635,0 ; 0,-0.635 0,0.635 ; -8,-8 -8,8 8,8 8,-8 -8,-8
3D body "LEXI.STEP": height 2.21, standoff 0, extent -8,-8 8,8

## LILY-W1 [mm] "Host-based Wi-Fi module"
height 4.14
pads (37):
  rect 0.7x1.5 smd paste+0 mask+0.05: 1(-6.195,-4.6) 2(-5.195,-4.6) 3(-4.195,-4.6) 4(-3.195,-4.6) 5(-2.195,-4.6) 6(-1.195,-4.6) 7(-0.195,-4.6) 8(0.805,-4.6) 9(1.805,-4.6) 10(2.805,-4.6) 11(2.805,4.6) 12(1.805,4.6) 13(0.805,4.6) 14(-0.195,4.6) 15(-1.195,4.6) 16(-2.195,4.6) 17(-3.195,4.6) 18(-4.195,4.6) 19(-5.195,4.6) 20(-6.195,4.6)
  rect 1.5x0.7 smd paste+0 mask+0.05: 21(-6.595,2) 22(-6.595,1) 23(-6.595,0) 24(-6.595,-1) 25(-6.595,-2)
  rect 0.7x0.7 smd paste+0 mask+0.05: 26(-2.385,-1.805) 27(-1.305,-1.805) 28(-0.225,-1.805) 29(-2.385,-0.725) 30(-1.305,-0.725) 31(-0.225,-0.725) 32(-2.385,0.355) 33(-1.305,0.355) 34(-0.225,0.355) 35(-2.385,1.435) 36(-1.305,1.435) 37(-0.225,1.435)
Top Overlay:
  circle w0.254: c-6.2,-6 r0.1
  lines w0.15: -6.995,-5 -6.995,-3 ; -6.995,3 -6.995,5 ; 3.505,-5 7.005,-5 7.005,5 3.505,5
Mechanical 13:
  lines w0.1: -6.995,-5 7.005,-5 7.005,5 -6.995,5 -6.995,-5
Mechanical 15:
  lines w0.05: -7.595,-5.6 7.205,-5.6 7.205,5.6 -7.595,5.6 -7.595,-5.6
  lines w0.1: -0.5,0 0,0 ; 0,-0.5 0,0 ; 0,0.5 0,0 ; 0.5,0 0,0
  text ".Designator" at 0.105,0.433 h1
3D body: height 4.14, standoff 0, extent 3.205,-5 7.005,5
3D body: height 2.54, standoff 0.05, extent -6.995,-5 3.205,5

## LISA-u2 [mm] "3.75G HSPA+ Cellular Module"
height 2.87
pads (76):
  rrect7% 1.8x0.8 smd paste-10: 1(-11.1,14.3) 2(-11.1,13.2) 3(-11.1,12.1) 4(-11.1,11) 5(-11.1,9.9) 6(-11.1,8.8) 7(-11.1,7.7) 8(-11.1,6.6) 9(-11.1,5.5) 10(-11.1,4.4) 11(-11.1,3.3) 12(-11.1,2.2) 13(-11.1,1.1) 14(-11.1,0) 15(-11.1,-1.1) 16(-11.1,-2.2) 17(-11.1,-3.3) 18(-11.1,-4.4) 19(-11.1,-5.5) 20(-11.1,-6.6) 21(-11.1,-7.7) 22(-11.1,-8.8) 23(-11.1,-9.9) 24(-11.1,-11) 25(-11.1,-12.1) 26(-11.1,-13.2) 27(-11.1,-14.3) 39(11.1,-14.3) 40(11.1,-13.2) 41(11.1,-12.1) 42(11.1,-11) 43(11.1,-9.9) 44(11.1,-8.8) 45(11.1,-7.7) 46(11.1,-6.6) 47(11.1,-5.5) 48(11.1,-4.4) 49(11.1,-3.3) 50(11.1,-2.2) 51(11.1,-1.1) 52(11.1,0) 53(11.1,1.1) 54(11.1,2.2) 55(11.1,3.3) 56(11.1,4.4) 57(11.1,5.5) 58(11.1,6.6) 59(11.1,7.7) 60(11.1,8.8) 61(11.1,9.9) 62(11.1,11) 63(11.1,12.1) 64(11.1,13.2) 65(11.1,14.3)
  rrect7% 0.8x1.8 smd paste-10: 28(-5.5,-16.5) 29(-4.4,-16.5) 30(-3.3,-16.5) 31(-2.2,-16.5) 32(-1.1,-16.5) 33(0,-16.5) 34(1.1,-16.5) 35(2.2,-16.5) 36(3.3,-16.5) 37(4.4,-16.5) 38(5.5,-16.5) 66(5.5,16.5) 67(4.4,16.5) 68(3.3,16.5) 69(2.2,16.5) 70(1.1,16.5) 71(0,16.5) 72(-1.1,16.5) 73(-2.2,16.5) 74(-3.3,16.5) 75(-4.4,16.5) 76(-5.5,16.5)
Top Overlay:
  circle w0.254: c-12.9,14.3 r0.1
  lines w0.15: -11.2,-14.9 -11.2,-16.6 -6.1,-16.6 ; -11.2,14.9 -11.2,16.6 -6.1,16.6 ; 6.1,-16.6 11.2,-16.6 11.2,-14.9 ; 6.1,16.6 11.2,16.6 11.2,14.9
Top Paste:
  drawing of 152 lines, arcs and shapes, not listed
Mechanical 15:
  lines w0.05: -12.5,-17.9 -12.5,17.9 12.5,17.9 12.5,-17.9 -12.5,-17.9
  lines w0.1: -1.499,0 0,0 1.501,0 ; 0,-1.419 0,0.1 0,1.545
  text ".Designator" at 0.1,0.433 h1
3D body: height 2.87, standoff 0, extent -11.2,-16.6 11.2,16.6

## LOGO [mm] "u-blox logo"
Top Overlay:
  drawing of 5 lines, arcs and shapes, not listed

## MAX-M8 [mm] "u-blox M8 concurrent GNSS modules"
height 2.7
pads (18):
  rect 1.8x0.7 smd paste-10: 1(4.75,-4.4) 9(4.75,4.4) 10(-4.75,4.4) 18(-4.75,-4.4)
  rect 1.8x0.8 smd paste-10: 2(4.75,-3.3) 3(4.75,-2.2) 4(4.75,-1.1) 5(4.75,0) 6(4.75,1.1) 7(4.75,2.2) 8(4.75,3.3) 11(-4.75,3.3) 12(-4.75,2.2) 13(-4.75,1.1) 14(-4.75,0) 15(-4.75,-1.1) 16(-4.75,-2.2) 17(-4.75,-3.3)
Top Overlay:
  circle w0.254: c7,-4.4 r0.1
  lines w0.254: -4.85,-5.05 4.85,-5.05 ; -4.85,5.05 4.85,5.05
Top Paste:
  region: -6.25,4.75 -6.25,4.05 -4.85,4.05 -4.85,4.15 -3.95,4.15 -3.95,4.65 -4.85,4.65 -4.85,4.75
  region: 6.25,4.05 6.25,4.75 4.85,4.75 4.85,4.65 3.95,4.65 3.95,4.15 4.85,4.15 4.85,4.05
  region: 6.25,-4.75 6.25,-4.05 4.85,-4.05 4.85,-4.15 3.95,-4.15 3.95,-4.65 4.85,-4.65 4.85,-4.75
  region: -6.25,-4.05 -6.25,-4.75 -4.85,-4.75 -4.85,-4.65 -3.95,-4.65 -3.95,-4.15 -4.85,-4.15 -4.85,-4.05
  region: -6.25,3.7 -6.25,2.9 -4.85,2.9 -4.85,3 -3.95,3 -3.95,3.6 -4.85,3.6 -4.85,3.7
  region: -6.25,2.6 -6.25,1.8 -4.85,1.8 -4.85,1.9 -3.95,1.9 -3.95,2.5 -4.85,2.5 -4.85,2.6
  region: -6.25,1.5 -6.25,0.7 -4.85,0.7 -4.85,0.8 -3.95,0.8 -3.95,1.4 -4.85,1.4 -4.85,1.5
  region: -6.25,0.4 -6.25,-0.4 -4.85,-0.4 -4.85,-0.3 -3.95,-0.3 -3.95,0.3 -4.85,0.3 -4.85,0.4
  region: -6.25,-0.7 -6.25,-1.5 -4.85,-1.5 -4.85,-1.4 -3.95,-1.4 -3.95,-0.8 -4.85,-0.8 -4.85,-0.7
  region: -6.25,-1.8 -6.25,-2.6 -4.85,-2.6 -4.85,-2.5 -3.95,-2.5 -3.95,-1.9 -4.85,-1.9 -4.85,-1.8
  region: -6.25,-2.9 -6.25,-3.7 -4.85,-3.7 -4.85,-3.6 -3.95,-3.6 -3.95,-3 -4.85,-3 -4.85,-2.9
  region: 6.25,-3.7 6.25,-2.9 4.85,-2.9 4.85,-3 3.95,-3 3.95,-3.6 4.85,-3.6 4.85,-3.7
  region: 6.25,-2.6 6.25,-1.8 4.85,-1.8 4.85,-1.9 3.95,-1.9 3.95,-2.5 4.85,-2.5 4.85,-2.6
  region: 6.25,-1.5 6.25,-0.7 4.85,-0.7 4.85,-0.8 3.95,-0.8 3.95,-1.4 4.85,-1.4 4.85,-1.5
  region: 6.25,-0.4 6.25,0.4 4.85,0.4 4.85,0.3 3.95,0.3 3.95,-0.3 4.85,-0.3 4.85,-0.4
  region: 6.25,0.7 6.25,1.5 4.85,1.5 4.85,1.4 3.95,1.4 3.95,0.8 4.85,0.8 4.85,0.7
  region: 6.25,1.8 6.25,2.6 4.85,2.6 4.85,2.5 3.95,2.5 3.95,1.9 4.85,1.9 4.85,1.8
  region: 6.25,2.9 6.25,3.7 4.85,3.7 4.85,3.6 3.95,3.6 3.95,3 4.85,3 4.85,2.9
Mechanical 15:
  lines w0.1: -0.5,0 0,0 ; 0,-0.5 0,0 ; 0,0.5 0,0 ; 0.5,0 0,0 ; -6.5,-5.5 -6.5,5.5 6.5,5.5 6.5,-5.5 -6.5,-5.5
  text ".Designator" at 0.1,0.433 h1
3D body: height 2.7, standoff 0, extent -4.851,-5.05 4.849,5.05

## MAYA-W1 [mm] "MAYA LGA, 86pin ,1.1mm Pitch, 14.3mm x 10.4mm"
height 1.8
pads (86):
  rect 0.6x0.6 smd: A1(-5.5,-4.4) A2(-5.5,-3.3) A3(-5.5,-2.2) A4(-5.5,-1.1) A5(-5.5,0) A6(-5.5,1.1) A7(-5.5,2.2) A8(-5.5,3.3) A9(-5.5,4.4) B1(-4.4,-4.4) B2(-4.4,-3.3) B3(-4.4,-2.2) B4(-4.4,-1.1) B5(-4.4,0) B6(-4.4,1.1) B7(-4.4,2.2) B8(-4.4,3.3) B9(-4.4,4.4) C1(-3.3,-4.4) C2(-3.3,-3.3) C4(-3.3,-1.1) C5(-3.3,0) C6(-3.3,1.1) C8(-3.3,3.3) C9(-3.3,4.4) D1(-2.2,-4.4) D2(-2.2,-3.3) D3(-2.2,-2.2) D7(-2.2,2.2) D8(-2.2,3.3) D9(-2.2,4.4) E1(-1.1,-4.4) E2(-1.1,-3.3) E3(-1.1,-2.2) E4(-1.1,-0.55) E5(-1.1,0.55) E7(-1.1,2.2) E8(-1.1,3.3) E9(-1.1,4.4) F1(0,-4.4) F2(0,-3.3) F3(0,-2.2) F4(0,-0.55) F5(0,0.55) F7(0,2.2) F8(0,3.3) F9(0,4.4) G1(1.1,-4.4) G2(1.1,-3.3) G3(1.1,-2.2) G4(1.1,-0.55) G5(1.1,0.55) G7(1.1,2.2) G8(1.1,3.3) G9(1.1,4.4) H1(2.2,-4.4) H2(2.2,-3.3) H3(2.2,-2.2) H4(2.2,-0.55) H5(2.2,0.55) H7(2.2,2.2) H8(2.2,3.3) H9(2.2,4.4) J1(3.3,-4.4) J2(3.3,-3.3) J3(3.3,-2.2) J4(3.3,-0.55) J5(3.3,0.55) J7(3.3,2.2) J8(3.3,3.3) J9(3.3,4.4) K1(4.4,-4.4) K2(4.4,-3.3) K3(4.4,-2.2) K4(4.4,-1.1) K5(4.4,0) K6(4.4,1.1) K7(4.4,2.2) K8(4.4,3.3) K9(4.4,4.4) L1(5.9,-4.4) L9(5.9,4.4) M1(7.4,-4.4) M2(7.4,-3.3) M8(7.4,3.3) M9(7.4,4.4)
Top Overlay:
  lines w0.127: 8.05,-5.35 -6.4,-5.35 -6.4,5.35 8.05,5.35
  lines w0.128: -6.343,-5.194 -6.193,-5.344 ; -6.3,-5.15 cw(c-6.3,-5.3) -6.15,-5.3 ; -6.3,-5.05 cw(c-6.325,-5.349) -6.025,-5.349
Mechanical 11:
  text ".Designator" at -1.075,-0.775 h1.5
Mechanical 13:
  lines w0.05: -6.25,-4.5 -5.5,-5.2 ; -6.25,-5.2 8.05,-5.2 8.05,5.2 -6.25,5.2 -6.25,-5.2
Mechanical 14:
  drawing of 328 lines, arcs and shapes, not listed
Mechanical 15:
  lines w0.05: 0.9,-0.1 1.9,-0.1 ; 1.4,-0.6 1.4,0.4 ; -6.45,-5.4 -6.45,5.4 8.25,5.4 8.25,-5.4 -6.45,-5.4
Mechanical 16:
  drawing of 492 lines, arcs and shapes, not listed
Multi-Layer:
  pour cut-out: 7.1,-4.1 7.1,-3.001 7.9,-2.998 7.9,-5.225 8.25,-5.225 8.25,5.325 7.9,5.325 7.9,3 7.1,3 7.1,4.1 4.7,4.1 4.7,-4.1
3D body "MAYA-W166.step": height 2.13, standoff -0.01, extent -6.25,-5.2 8.05,5.2

## MAYA-W2_2UFL-ANT [mm] "MAYA-W2 Footprint 86 Pin,  / U.FL Antenna connection"
height 2.12
pads (86):
  rrect10% 0.6x0.6 smd mask+0.05: A1(4.4,-6.45) A2(3.3,-6.45) A3(2.2,-6.45) A4(1.1,-6.45) A5(0,-6.45) A6(-1.1,-6.45) A7(-2.2,-6.45) A8(-3.3,-6.45) A9(-4.4,-6.45) B1(4.4,-5.35) B2(3.3,-5.35) B3(2.2,-5.35) B4(1.1,-5.35) B5(0,-5.35) B6(-1.1,-5.35) B7(-2.2,-5.35) B8(-3.3,-5.35) B9(-4.4,-5.35) C1(4.4,-4.25) C2(3.3,-4.25) C4(1.1,-4.25) C5(0,-4.25) C6(-1.1,-4.25) C8(-3.3,-4.25) C9(-4.4,-4.25) D1(4.4,-3.15) D2(3.3,-3.15) D3(2.2,-3.15) D7(-2.2,-3.15) D8(-3.3,-3.15) D9(-4.4,-3.15) E1(4.4,-2.05) E2(3.3,-2.05) E3(2.2,-2.05) E4(0.55,-2.05) E5(-0.55,-2.05) E7(-2.2,-2.05) E8(-3.3,-2.05) E9(-4.4,-2.05) F1(4.4,-0.95) F2(3.3,-0.95) F3(2.2,-0.95) F4(0.55,-0.95) F5(-0.55,-0.95) F7(-2.2,-0.95) F8(-3.3,-0.95) F9(-4.4,-0.95) G1(4.4,0.15) G2(3.3,0.15) G3(2.2,0.15) G4(0.55,0.15) G5(-0.55,0.15) G7(-2.2,0.15) G8(-3.3,0.15) G9(-4.4,0.15) H1(4.4,1.25) H2(3.3,1.25) H3(2.2,1.25) H4(0.55,1.25) H5(-0.55,1.25) H7(-2.2,1.25) H8(-3.3,1.25) H9(-4.4,1.25) J1(4.4,2.35) J2(3.3,2.35) J3(2.2,2.35) J4(0.55,2.35) J5(-0.55,2.35) J7(-2.2,2.35) J8(-3.3,2.35) J9(-4.4,2.35) K1(4.4,3.45) K2(3.3,3.45) K3(2.2,3.45) K4(1.1,3.45) K5(0,3.45) K6(-1.1,3.45) K7(-2.2,3.45) K8(-3.3,3.45) K9(-4.4,3.45) L1(4.4,4.95) L9(-4.4,4.95) M1(4.4,6.45) M2(3.3,6.45) M8(-3.3,6.45) M9(-4.4,6.45)
Top Overlay:
  circle w0.254: c5.9,-7.175 r0.1
  lines w0.15: -5.425,-5.95 -5.425,-7.45 -3.925,-7.45 ; -5.425,5.95 -5.425,7.45 -5.05,7.45 ; 3.925,-7.45 5.425,-7.45 5.425,-5.95 ; 5.05,7.45 5.425,7.45 5.425,5.95
Mechanical 11:
  text ".Designator" at -7.498,-0.5 h1.5
Mechanical 13:
  lines w0.05: 4.6,-7.325 5.3,-6.575 ; -5.3,-7.325 -5.3,7.325 5.3,7.325 5.3,-7.325 -5.3,-7.325
Mechanical 15:
  lines w0.005: -0.25,0 0.25,0 ; 0,-0.25 0,0.25 ; -5.5,-7.525 -5.5,7.525 5.5,7.525 5.5,-7.525 -5.5,-7.525
Multi-Layer:
  pour cut-out: 4.099,6.15 3,6.15 2.997,6.95 5.5,6.95 5.5,7.525 -5.5,7.525 -5.5,6.95 -3.001,6.95 -3.001,6.15 -4.101,6.15 -4.101,3.75 4.099,3.75
3D body "MAYA-W260_REVC.step": height 1.92, standoff 0, extent -5.2,-7.15 5.2,7.15

## MAYA-W2_EMB-ANT [mm] "MAYA-W2 Footprint 86 Pin,  / Embedded antenna"
height 2.12
pads (86):
  rrect10% 0.6x0.6 smd mask+0.05: A1(4.4,-6.45) A2(3.3,-6.45) A3(2.2,-6.45) A4(1.1,-6.45) A5(0,-6.45) A6(-1.1,-6.45) A7(-2.2,-6.45) A8(-3.3,-6.45) A9(-4.4,-6.45) B1(4.4,-5.35) B2(3.3,-5.35) B3(2.2,-5.35) B4(1.1,-5.35) B5(0,-5.35) B6(-1.1,-5.35) B7(-2.2,-5.35) B8(-3.3,-5.35) B9(-4.4,-5.35) C1(4.4,-4.25) C2(3.3,-4.25) C4(1.1,-4.25) C5(0,-4.25) C6(-1.1,-4.25) C8(-3.3,-4.25) C9(-4.4,-4.25) D1(4.4,-3.15) D2(3.3,-3.15) D3(2.2,-3.15) D7(-2.2,-3.15) D8(-3.3,-3.15) D9(-4.4,-3.15) E1(4.4,-2.05) E2(3.3,-2.05) E3(2.2,-2.05) E4(0.55,-2.05) E5(-0.55,-2.05) E7(-2.2,-2.05) E8(-3.3,-2.05) E9(-4.4,-2.05) F1(4.4,-0.95) F2(3.3,-0.95) F3(2.2,-0.95) F4(0.55,-0.95) F5(-0.55,-0.95) F7(-2.2,-0.95) F8(-3.3,-0.95) F9(-4.4,-0.95) G1(4.4,0.15) G2(3.3,0.15) G3(2.2,0.15) G4(0.55,0.15) G5(-0.55,0.15) G7(-2.2,0.15) G8(-3.3,0.15) G9(-4.4,0.15) H1(4.4,1.25) H2(3.3,1.25) H3(2.2,1.25) H4(0.55,1.25) H5(-0.55,1.25) H7(-2.2,1.25) H8(-3.3,1.25) H9(-4.4,1.25) J1(4.4,2.35) J2(3.3,2.35) J3(2.2,2.35) J4(0.55,2.35) J5(-0.55,2.35) J7(-2.2,2.35) J8(-3.3,2.35) J9(-4.4,2.35) K1(4.4,3.45) K2(3.3,3.45) K3(2.2,3.45) K4(1.1,3.45) K5(0,3.45) K6(-1.1,3.45) K7(-2.2,3.45) K8(-3.3,3.45) K9(-4.4,3.45) L1(4.4,4.95) L9(-4.4,4.95) M1(4.4,6.45) M2(3.3,6.45) M8(-3.3,6.45) M9(-4.4,6.45)
Top Overlay:
  circle w0.254: c5.9,-7.175 r0.1
  lines w0.15: -5.425,-5.95 -5.425,-7.45 -3.925,-7.45 ; -5.425,5.95 -5.425,7.45 -5.05,7.45 ; 3.925,-7.45 5.425,-7.45 5.425,-5.95 ; 5.05,7.45 5.425,7.45 5.425,5.95
Mechanical 11:
  text ".Designator" at -7.498,-0.5 h1.5
Mechanical 13:
  lines w0.05: 4.6,-7.325 5.3,-6.575 ; -5.3,-7.325 -5.3,7.325 5.3,7.325 5.3,-7.325 -5.3,-7.325
Mechanical 15:
  lines w0.005: -0.25,0 0.25,0 ; 0,-0.25 0,0.25 ; -5.5,-7.525 -5.5,7.525 5.5,7.525 5.5,-7.525 -5.5,-7.525
Multi-Layer:
  pour cut-out: 4.099,6.15 3,6.15 2.997,6.95 5.5,6.95 5.5,7.525 -5.5,7.525 -5.5,6.95 -3.001,6.95 -3.001,6.15 -4.101,6.15 -4.101,3.75 4.099,3.75
3D body "MAYA-W266_W276_REVC.step": height 1.92, standoff 0, extent -5.2,-7.15 5.2,7.15

## MAYA_LGA90R_1430X1040 [mm] "MAYA-W4 LGA-90"
height 1.8
pads (90):
  rect 0.6x0.6 smd: A1(-5.5,-4.4) A2(-5.5,-3.3) A3(-5.5,-2.2) A4(-5.5,-1.1) A5(-5.5,0) A6(-5.5,1.1) A7(-5.5,2.2) A8(-5.5,3.3) A9(-5.5,4.4) B1(-4.4,-4.4) B2(-4.4,-3.3) B3(-4.4,-2.2) B4(-4.4,-1.1) B5(-4.4,0) B6(-4.4,1.1) B7(-4.4,2.2) B8(-4.4,3.3) B9(-4.4,4.4) C1(-3.3,-4.4) C2(-3.3,-3.3) C3(-3.3,-2.2) C4(-3.3,-1.1) C5(-3.3,0) C6(-3.3,1.1) C7(-3.3,2.2) C8(-3.3,3.3) C9(-3.3,4.4) D1(-2.2,-4.4) D2(-2.2,-3.3) D3(-2.2,-2.2) D4(-2.2,-0.55) D5(-2.2,0.55) D7(-2.2,2.2) D8(-2.2,3.3) D9(-2.2,4.4) E1(-1.1,-4.4) E2(-1.1,-3.3) E3(-1.1,-2.2) E4(-1.1,-0.55) E5(-1.1,0.55) E7(-1.1,2.2) E8(-1.1,3.3) E9(-1.1,4.4) F1(0,-4.4) F2(0,-3.3) F3(0,-2.2) F4(0,-0.55) F5(0,0.55) F7(0,2.2) F8(0,3.3) F9(0,4.4) G1(1.1,-4.4) G2(1.1,-3.3) G3(1.1,-2.2) G4(1.1,-0.55) G5(1.1,0.55) G7(1.1,2.2) G8(1.1,3.3) G9(1.1,4.4) H1(2.2,-4.4) H2(2.2,-3.3) H3(2.2,-2.2) H4(2.2,-0.55) H5(2.2,0.55) H7(2.2,2.2) H8(2.2,3.3) H9(2.2,4.4) J1(3.3,-4.4) J2(3.3,-3.3) J3(3.3,-2.2) J4(3.3,-0.55) J5(3.3,0.55) J7(3.3,2.2) J8(3.3,3.3) J9(3.3,4.4) K1(4.4,-4.4) K2(4.4,-3.3) K3(4.4,-2.2) K4(4.4,-1.1) K5(4.4,0) K6(4.4,1.1) K7(4.4,2.2) K8(4.4,3.3) K9(4.4,4.4) L1(5.9,-4.4) L9(5.9,4.4) M1(7.4,-4.4) M2(7.4,-3.3) M8(7.4,3.3) M9(7.4,4.4)
Top Overlay:
  circle w0.254: c-6.175,-5.875 r0.1
  lines w0.15: -6.45,-3.9 -6.45,-5.4 -4.95,-5.4 ; -6.45,3.9 -6.45,5.4 -4.95,5.4 ; 6.4,-5.4 7.9,-5.4 ; 6.55,5.4 7.9,5.4
Mechanical 11:
  text ".Designator" at -3.598,-0.433 h1
Mechanical 13:
  lines w0.1: -6.25,-4.5 -5.5,-5.2 ; -6.25,-5.2 -6.25,5.2 8.05,5.2 8.05,-5.2 -6.25,-5.2
Mechanical 15:
  lines w0.05: 0.9,-0.1 1.9,-0.1 ; 1.4,-0.6 1.4,0.4 ; -6.45,-5.4 8.25,-5.4 8.25,5.4 -6.45,5.4 -6.45,-5.4
Multi-Layer:
  pour cut-out: 7.1,-4.1 7.1,-3.001 7.9,-2.998 7.9,-5.225 8.25,-5.225 8.25,5.325 7.9,5.325 7.9,3 7.1,3 7.1,4.1 4.7,4.1 4.7,-4.1
3D body "NORA-B101_revA.step": height 1.78, standoff -0.01, extent -6.25,-5.2 8.05,5.2

## NEO [mm] "u-blox NEO GNSS module"
pads (24):
  rect 1.8x0.8 smd paste-0.1: 1(5.842,-7) 2(5.842,-5.9) 3(5.842,-4.8) 4(5.842,-3.7) 5(5.842,-2.6) 6(5.842,-1.5) 7(5.842,-0.4) 8(5.842,2.6) 9(5.842,3.7) 10(5.842,4.8) 11(5.842,5.9) 12(5.842,7) 13(-5.842,7) 14(-5.842,5.9) 15(-5.842,4.8) 16(-5.842,3.7) 17(-5.842,2.6) 18(-5.842,-0.4) 19(-5.842,-1.5) 20(-5.842,-2.6) 21(-5.842,-3.7) 22(-5.842,-4.8) 23(-5.842,-5.9) 24(-5.842,-7)
Top Overlay:
  circle w0.38: c7.35,-7 r0.058
  lines w0.16: -6.109,-8 6.096,-8 ; -6.109,7.996 6.09,7.996 ; -6.102,0.299 -6.102,1.893 ; 6.096,0.255 6.096,1.919
Top Paste:
  rectangle: 5.642,-7.4 6.842,-6.6
  rectangle: 5.642,-6.3 6.842,-5.5
  rectangle: 5.642,-5.2 6.842,-4.4
  rectangle: 5.642,-4.1 6.842,-3.3
  rectangle: 5.642,-3 6.842,-2.2
  rectangle: 5.642,-1.9 6.842,-1.1
  rectangle: 5.642,-0.8 6.842,0
  rectangle: 5.642,2.2 6.842,3
  rectangle: 5.642,3.3 6.842,4.1
  rectangle: 5.642,4.4 6.842,5.2
  rectangle: 5.642,5.5 6.842,6.3
  rectangle: 5.642,6.6 6.842,7.4
  rectangle: -6.833,6.6 -5.633,7.4
  rectangle: -6.833,5.5 -5.633,6.3
  rectangle: -6.833,4.4 -5.633,5.2
  rectangle: -6.833,3.3 -5.633,4.1
  rectangle: -6.833,2.2 -5.633,3
  rectangle: -6.833,-0.8 -5.633,0
  rectangle: -6.833,-1.9 -5.633,-1.1
  rectangle: -6.833,-3 -5.633,-2.2
  rectangle: -6.833,-5.2 -5.633,-4.4
  rectangle: -6.833,-6.3 -5.633,-5.5
  rectangle: -6.833,-7.4 -5.633,-6.6
  rectangle: -6.833,-4.1 -5.633,-3.3
Mechanical 15:
  lines w0.1: -1.499,0 0,0 ; 0,-1.519 0,0 ; 0,1.445 0,0 ; 1.501,0 0,0 ; -7,-8.5 7,-8.5 7,8.5 -7,8.5 -7,-8.5
  text ".Designator" at 0.1,0.433 h1
3D body "NEO (STEP-AP214)_B.STEP": height 2.28, standoff -0.05, extent -6.104,-8 6.096,8